# Altium integrated library MIC2981_82YWM.IntLib: 1 symbol
Pins are listed as number, name and electrical type; pins without a type are passive.

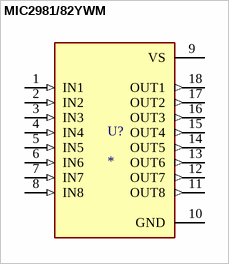
[diagram p0: symbol MIC2981/82YWM]

## MIC2981/82YWM
designator U?
Power Switch/Driver 1:1 Bipolar 500mA 18-SOP (Wide); MF: Microchip Technology; MP: MIC2981/82YWM-TR; SnapEDA_Link: https://www.snapeda.com/parts/MIC2981/82YWM-TR/Microchip/view-part/?ref=snap; Package: SOIC-18 Microchip; Value: *; Check_prices: https://www.snapeda.com/parts/MIC2981/82YWM-TR/Microchip/view-part/?ref=eda
footprint SOP127P1031X261-18N
pins: 1 IN1 (in), 2 IN2 (in), 3 IN3 (in), 4 IN4 (in), 5 IN5 (in), 6 IN6 (in), 7 IN7 (in), 8 IN8 (in), 9 VS (power), 10 GND (power), 11 OUT8 (out), 12 OUT7 (out), 13 OUT6 (out), 14 OUT5 (out), 15 OUT4 (out), 16 OUT3 (out), 17 OUT2 (out), 18 OUT1 (out)